# EAGLE library part CON_RAPS128 (library dp_devices.v6)
RADDS Stepper Driver
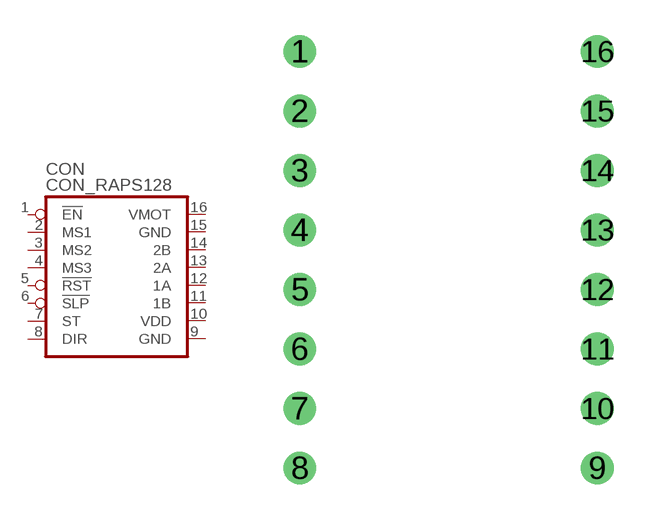
[diagram p170: symbol with the pads of CON_RAPS128; footprint CON_RAPS128]

Designator prefix CON

## CON_RAPS128  [CON_RAPS128]
1  !EN  in
2  MS1
3  MS2
4  MS3
5  !RST  in
6  !SLP  in
7  ST
8  DIR
9  GND  pwr
10  VDD  pwr
11  1B
12  1A
13  2A
14  2B
15  GND  pwr
16  VMOT  pwr

## Footprint CON_RAPS128 (pad centres in mm)
drill 0.8 pad 1.4: 1 -6.35,8.89; 2 -6.35,6.35; 3 -6.35,3.81; 4 -6.35,1.27; 5 -6.35,-1.27; 6 -6.35,-3.81; 7 -6.35,-6.35; 8 -6.35,-8.89; 9 6.35,-8.89; 10 6.35,-6.35; 11 6.35,-3.81; 12 6.35,-1.27; 13 6.35,1.27; 14 6.35,3.81; 15 6.35,6.35; 16 6.35,8.89